# Altium footprint library L08R5000Q1.PCBLIB: 1 footprints
Each footprint in its own frame and in the unit in brackets; x right, y up, seen from the top. Pads: shape width x height; smd on the part's side, far side on the other; paste and mask are expansions set on the pad; w line width, h text height; cw(c..) or ccw(c..) is an arc to the next point about the centre after c.
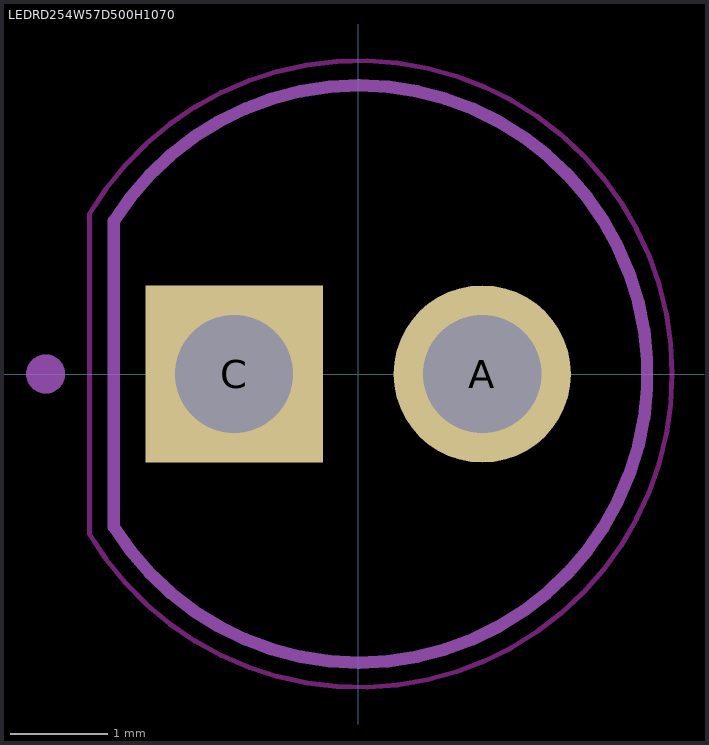
[diagram p0: the footprint, top view; thin cyan lines are the x and y axes]

## LEDRD254W57D500H1070 [mil]
pads (2):
  round 71.46 hole 47.64: A(50,0)
  rect 71.46x71.46 / inner round 66.02 / far side rect 71.46x71.46 hole 47.64: C(-50,0)
Top keep-out:
  lines w1.97: -108.27,-64.57 -108.27,64.57 cw(c0.26,0) -108.27,-64.57
tDocu:
  circle w7.87: c-125.98,0 r3.94
  lines w5: -98.43,-61.65 -98.43,61.65 cw(c0.23,0) -98.43,-61.65
tPlace:
  circle w7.87: c-125.98,0 r3.94
  lines w5: -98.43,-61.65 -98.43,61.65 cw(c0.23,0) -98.43,-61.65